# Altium footprint library SYNCBOX_TST.PcbLib: 267 footprints (part 1 of 17)
Each footprint in its own frame and in the unit in brackets; x right, y up, seen from the top. Pads: shape width x height; smd on the part's side, far side on the other; paste and mask are expansions set on the pad; w line width, h text height; cw(c..) or ccw(c..) is an arc to the next point about the centre after c.
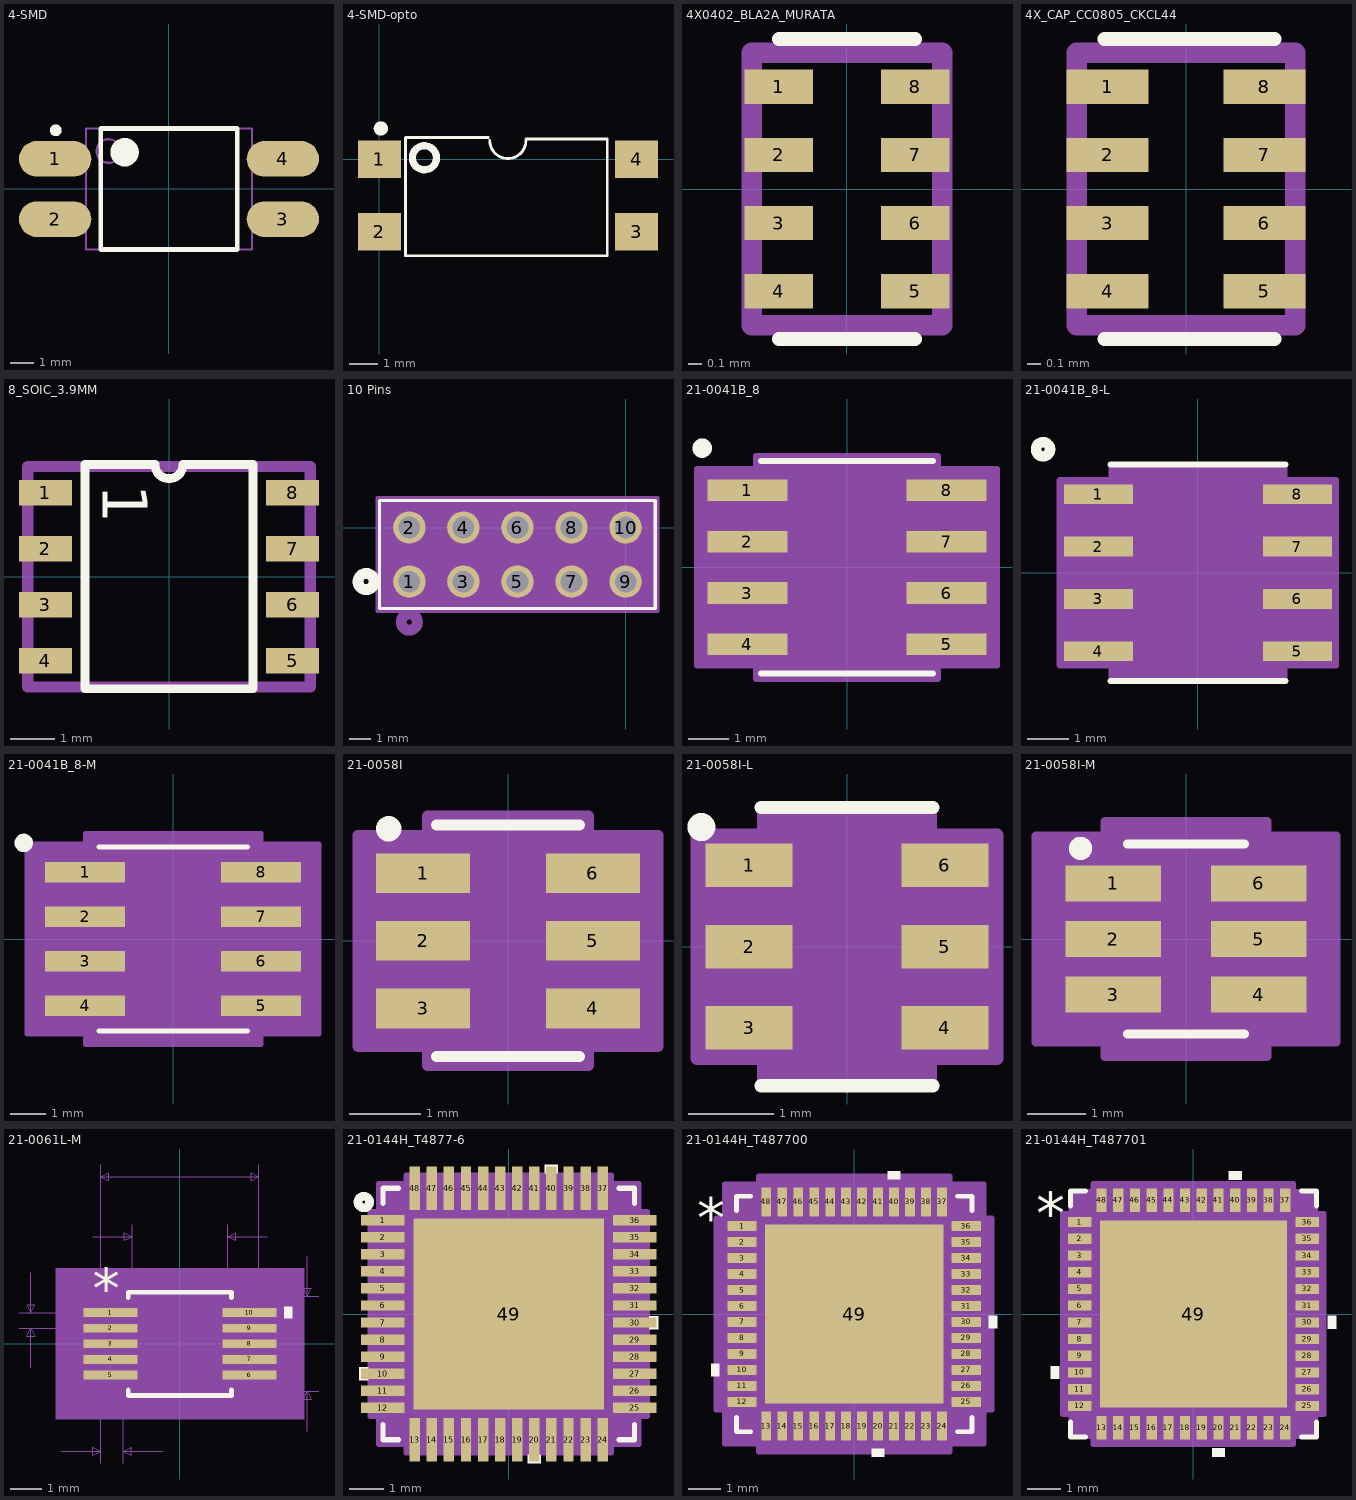
[diagram p0: the footprints below, top view; thin cyan lines are the x and y axes]

## 4-SMD [mm]
height 4.6
pads (4):
  oval 3.05x1.5 smd: 1(-4.8,1.27) 2(-4.8,-1.27) 3(4.8,-1.27) 4(4.8,1.27)
Top Overlay:
  circle w0.6: c-1.875,1.55 r0.3
  lines w0.2: -2.875,-2.55 -2.875,2.55 2.875,2.55 2.875,-2.55 -2.875,-2.55
  lines w0.25: -4.651,2.487 ccw(c-4.775,2.475) -4.65,2.475
Mechanical 13:
  circle w0.1: c-2.55,1.6 r0.5
  lines w0.1: -3.5,-2.55 -3.5,2.55 3.5,2.55 3.5,-2.55 -3.5,-2.55
3D body "LSOP-4.STEP": height 2.07, standoff -0.07, extent -4.947,-1.898 5.253,2.202

## 4-SMD-opto [mm]
pads (4):
  rect 1.5x1.3 smd: 1(0,0) 2(0,-2.54) 3(9,-2.54) 4(9,0)
Top Overlay:
  circle w0.254: c1.575,0.051 r0.423
  lines w0.1: 3.81,0.762 0.914,0.762 0.914,-3.378 7.976,-3.378 7.976,0.711 5.135,0.711 ; 3.861,0.66 ccw(c4.496,0.66) 5.131,0.66
  lines w0.25: 0.175,1.09 ccw(c0.051,1.078) 0.176,1.078
3D body "LSOP-4.STEP": height 2.09, standoff -0.05, extent -0.629,-3.345 9.571,0.755

## 4X0402_BLA2A_MURATA [mm]
pads (8):
  rect 0.5x0.25 smd mask+0.025: 1(-0.5,0.75) 2(-0.5,0.25) 3(-0.5,-0.25) 4(-0.5,-0.75) 5(0.5,-0.75) 6(0.5,-0.25) 7(0.5,0.25) 8(0.5,0.75)
Top Overlay:
  lines w0.1: -0.5,-1.1 0.5,-1.1 ; -0.5,1.1 0.5,1.1
Mechanical 16:
  lines w0.15: -0.7,-1 0.7,-1 0.7,1 -0.7,1 -0.7,-1
Mechanical 29:
  text ".Designator" at 0.2,-0.7 h0.4
3D body: height 0.5, standoff 0, extent -0.5,-1 0.5,1

## 4X_CAP_CC0805_CKCL44 [mm]
pads (8):
  rect 0.6x0.25 smd mask+0.025: 1(-0.575,0.75) 2(-0.575,0.25) 3(-0.575,-0.25) 4(-0.575,-0.75) 5(0.575,-0.75) 6(0.575,-0.25) 7(0.575,0.25) 8(0.575,0.75)
Top Overlay:
  lines w0.1: -0.6,-1.1 0.65,-1.1 ; -0.6,1.1 0.65,1.1
Mechanical 16:
  lines w0.15: -0.8,-1 -0.8,1 0.8,1 0.8,-1 -0.8,-1
Mechanical 29:
  text ".Designator" at -0.2,0.7 h0.4
3D body: height 1, standoff 0, extent -0.7,-1 0.7,1

## 8_SOIC_3.9MM [mm]
pads (8):
  rect 1.2x0.58 smd: 1(-2.8,1.905) 2(-2.8,0.635) 3(-2.8,-0.635) 4(-2.8,-1.905) 5(2.8,-1.905) 6(2.8,-0.635) 7(2.8,0.635) 8(2.8,1.905)
Top Overlay:
  lines w0.2: -1.905,-2.54 1.905,-2.54 1.905,2.54 0.318,2.54 cw(c0,2.54) -0.318,2.54 -1.905,2.54 -1.905,-2.54
  text "1" at -1.5,2.1 h1.02
Mechanical 16:
  circle w0.254: c-2.7,1.9 r0.1
  lines w0.254: -3.2,-2.5 -3.2,2.5 3.2,2.5 3.2,-2.5 -3.2,-2.5
Mechanical 29:
  text ".Designator" at 1.1,0.6 h1.52
3D body "SOIC-8-1.step": height 1.75, standoff 0, extent -3,-2.45 3,2.45

## 10 Pins [mil]
pads (10):
  round 60 hole 40 paste+0 mask+0: 1(-400,-100) 2(-400,0) 3(-300,-100) 4(-300,0) 5(-200,-100) 6(-200,0) 7(-100,-100) 8(-100,0) 9(0,-100) 10(0,0)
Top Overlay:
  circle w20: c-480,-100 r15
  lines w6: -455,-150 55,-150 55,50 -455,50 -455,-150
Bottom Overlay:
  circle w20: c-480,-100 r15
Mechanical 13:
  circle w20: c-400,-175 r15
  lines w1: -450,-145 50,-145 50,45 -450,45 -450,-145
Mechanical 15:
  region: 60,55 -460,55 -460,-155 60,-155
  region: 50,45 -450,45 -450,-145 50,-145
  lines w6: -460,-155 -460,55 60,55 60,-155 -460,-155
3D body "PR20205VBDN.STEP": height 329.79, standoff -100.11, extent -450,-150 50,50
3D body: height 10, standoff 0, extent 0,0 10,10

## 21-0041B_8 [mil]
pads (8):
  rect 78x21 smd paste+0 mask+0: 1(-97,75) 2(-97,25) 3(-97,-25) 4(-97,-75) 5(97,-75) 6(97,-25) 7(97,25) 8(97,75)
Top Overlay:
  circle w10: c-141,116 r4.47
  lines w6: -83.5,-103.5 83.5,-103.5 ; -83.5,103.5 83.5,103.5
Mechanical 13:
  lines w0: -12,98.5 ccw(c0,98.5) 12,98.5
  lines w1: -122,-84.5 -122,-65.5 -78.5,-65.5 -78.5,-84.5 -122,-84.5 ; -122,-34.5 -122,-15.5 -78.5,-15.5 -78.5,-34.5 -122,-34.5 ; -122,15.5 -122,34.5 -78.5,34.5 -78.5,15.5 -122,15.5 ; -122,65.5 -122,84.5 -78.5,84.5 -78.5,65.5 -122,65.5 ; -78.5,-98.5 78.5,-98.5 78.5,98.5 -78.5,98.5 -78.5,-98.5 ; 78.5,-84.5 78.5,-65.5 122,-65.5 122,-84.5 78.5,-84.5 ; 78.5,-34.5 78.5,-15.5 122,-15.5 122,-34.5 78.5,-34.5 ; 78.5,15.5 78.5,34.5 122,34.5 122,15.5 78.5,15.5 ; 78.5,65.5 78.5,84.5 122,84.5 122,65.5 78.5,65.5
  text "*" at -76,45.5 h50
Mechanical 15:
  region: -88.5,-95.5 -146,-95.5 -146,95.5 -88.5,95.5 -88.5,108.5 88.5,108.5 88.5,95.5 146,95.5 146,-95.5 88.5,-95.5 88.5,-108.5 -88.5,-108.5
  lines w6: -146,-95.5 -146,95.5 -88.5,95.5 -88.5,108.5 88.5,108.5 88.5,95.5 146,95.5 146,-95.5 88.5,-95.5 88.5,-108.5 -88.5,-108.5 -88.5,-95.5 -146,-95.5
3D body "21-0041B_8.stp": height 69.09, standoff 0, extent -122.01,-98.5 122.01,98.5
3D body: height 10, standoff 0, extent 0,0 10,10

## 21-0041B_8-L [mil]
pads (8):
  rect 66x19 smd paste+0 mask+0: 1(-95,75) 2(-95,25) 3(-95,-25) 4(-95,-75) 5(95,-75) 6(95,-25) 7(95,25) 8(95,75)
Top Overlay:
  circle w10: c-148,118 r6.71
  lines w6: -83.5,-103.5 83.5,-103.5 ; -83.5,103.5 83.5,103.5
Mechanical 13:
  lines w0: -12,98.5 ccw(c0,98.5) 12,98.5
  lines w1: -122,-84.5 -122,-65.5 -78.5,-65.5 -78.5,-84.5 -122,-84.5 ; -122,-34.5 -122,-15.5 -78.5,-15.5 -78.5,-34.5 -122,-34.5 ; -122,15.5 -122,34.5 -78.5,34.5 -78.5,15.5 -122,15.5 ; -122,65.5 -122,84.5 -78.5,84.5 -78.5,65.5 -122,65.5 ; -78.5,-98.5 78.5,-98.5 78.5,98.5 -78.5,98.5 -78.5,-98.5 ; 78.5,-84.5 78.5,-65.5 122,-65.5 122,-84.5 78.5,-84.5 ; 78.5,-34.5 78.5,-15.5 122,-15.5 122,-34.5 78.5,-34.5 ; 78.5,15.5 78.5,34.5 122,34.5 122,15.5 78.5,15.5 ; 78.5,65.5 78.5,84.5 122,84.5 122,65.5 78.5,65.5
  text "*" at -76,45.5 h50
Mechanical 15:
  region: -82.5,-88.5 -132,-88.5 -132,88.5 -82.5,88.5 -82.5,102.5 82.5,102.5 82.5,88.5 132,88.5 132,-88.5 82.5,-88.5 82.5,-102.5 -82.5,-102.5
  lines w6: -132,-88.5 -132,88.5 -82.5,88.5 -82.5,102.5 82.5,102.5 82.5,88.5 132,88.5 132,-88.5 82.5,-88.5 82.5,-102.5 -82.5,-102.5 -82.5,-88.5 -132,-88.5
3D body: height 10, standoff 0, extent 0,0 10,10
3D body "21-0041B_8-L.stp": height 69.09, standoff 0, extent -122,-98.5 122.01,98.51

## 21-0041B_8-M [mil]
pads (8):
  rect 90x23 smd paste+0 mask+0: 1(-99,75) 2(-99,25) 3(-99,-25) 4(-99,-75) 5(99,-75) 6(99,-25) 7(99,25) 8(99,75)
Top Overlay:
  circle w10: c-168,108 r5.39
  lines w6: -83.5,-103.5 83.5,-103.5 ; -83.5,103.5 83.5,103.5
Mechanical 13:
  lines w0: -12,98.5 ccw(c0,98.5) 12,98.5
  lines w1: -122,-84.5 -122,-65.5 -78.5,-65.5 -78.5,-84.5 -122,-84.5 ; -122,-34.5 -122,-15.5 -78.5,-15.5 -78.5,-34.5 -122,-34.5 ; -122,15.5 -122,34.5 -78.5,34.5 -78.5,15.5 -122,15.5 ; -122,65.5 -122,84.5 -78.5,84.5 -78.5,65.5 -122,65.5 ; -78.5,-98.5 78.5,-98.5 78.5,98.5 -78.5,98.5 -78.5,-98.5 ; 78.5,-84.5 78.5,-65.5 122,-65.5 122,-84.5 78.5,-84.5 ; 78.5,-34.5 78.5,-15.5 122,-15.5 122,-34.5 78.5,-34.5 ; 78.5,15.5 78.5,34.5 122,34.5 122,15.5 78.5,15.5 ; 78.5,65.5 78.5,84.5 122,84.5 122,65.5 78.5,65.5
  text "*" at -76,45.5 h50
Mechanical 15:
  region: -98.5,-106.5 -164,-106.5 -164,106.5 -98.5,106.5 -98.5,118.5 98.5,118.5 98.5,106.5 164,106.5 164,-106.5 98.5,-106.5 98.5,-118.5 -98.5,-118.5
  lines w6: -164,-106.5 -164,106.5 -98.5,106.5 -98.5,118.5 98.5,118.5 98.5,106.5 164,106.5 164,-106.5 98.5,-106.5 98.5,-118.5 -98.5,-118.5 -98.5,-106.5 -164,-106.5
3D body "21-0041B_8-M.stp": height 69.09, standoff 0, extent -122,-98.5 122.01,98.51
3D body: height 10, standoff 0, extent 0,0 10,10

## 21-0058I [mil]
pads (6):
  rect 52x22 smd paste+0 mask+0: 1(-47,37.4) 2(-47,0) 3(-47,-37.4) 4(47,-37.4) 5(47,0) 6(47,37.4)
Top Overlay:
  circle w10: c-66,62 r2
  lines w6: -39.5,-64 39.5,-64 ; -39.5,64 39.5,64
Mechanical 13:
  lines w0: -12,59 ccw(c0,59) 12,59
  lines w1: -59,-47.4 -59,-27.4 -34.5,-27.4 -34.5,-47.4 -59,-47.4 ; -59,-10 -59,10 -34.5,10 -34.5,-10 -59,-10 ; -59,27.4 -59,47.4 -34.5,47.4 -34.5,27.4 -59,27.4 ; -34.5,-59 34.5,-59 34.5,59 -34.5,59 -34.5,-59 ; 34.5,-47.4 34.5,-27.4 59,-27.4 59,-47.4 34.5,-47.4 ; 34.5,-10 34.5,10 59,10 59,-10 34.5,-10 ; 34.5,27.4 34.5,47.4 59,47.4 59,27.4 34.5,27.4
  text "*" at -32,6 h50
Mechanical 15:
  region: -44.5,-58.4 -83,-58.4 -83,58.4 -44.5,58.4 -44.5,69 44.5,69 44.5,58.4 83,58.4 83,-58.4 44.5,-58.4 44.5,-69 -44.5,-69
  lines w6: -83,-58.4 -83,58.4 -44.5,58.4 -44.5,69 44.5,69 44.5,58.4 83,58.4 83,-58.4 44.5,-58.4 44.5,-69 -44.5,-69 -44.5,-58.4 -83,-58.4
3D body: height 10, standoff 0, extent 0,0 10,10
3D body "21-0058I.stp": height 57.09, standoff 0, extent -59.02,-59.02 59.02,59.02

## 21-0058I-L [mil]
pads (6):
  rect 40x20 smd paste+0 mask+0: 1(-45,37.4) 2(-45,0) 3(-45,-37.4) 4(45,-37.4) 5(45,0) 6(45,37.4)
Top Overlay:
  circle w10: c-67,55 r1.41
  lines w6: -39.5,-64 39.5,-64 ; -39.5,64 39.5,64
Mechanical 13:
  lines w0: -12,59 ccw(c0,59) 12,59
  lines w1: -59,-47.4 -59,-27.4 -34.5,-27.4 -34.5,-47.4 -59,-47.4 ; -59,-10 -59,10 -34.5,10 -34.5,-10 -59,-10 ; -59,27.4 -59,47.4 -34.5,47.4 -34.5,27.4 -59,27.4 ; -34.5,-59 34.5,-59 34.5,59 -34.5,59 -34.5,-59 ; 34.5,-47.4 34.5,-27.4 59,-27.4 59,-47.4 34.5,-47.4 ; 34.5,-10 34.5,10 59,10 59,-10 34.5,-10 ; 34.5,27.4 34.5,47.4 59,47.4 59,27.4 34.5,27.4
  text "*" at -32,6 h50
Mechanical 15:
  region: -38.5,-51.4 -69,-51.4 -69,51.4 -38.5,51.4 -38.5,63 38.5,63 38.5,51.4 69,51.4 69,-51.4 38.5,-51.4 38.5,-63 -38.5,-63
  lines w6: -69,-51.4 -69,51.4 -38.5,51.4 -38.5,63 38.5,63 38.5,51.4 69,51.4 69,-51.4 38.5,-51.4 38.5,-63 -38.5,-63 -38.5,-51.4 -69,-51.4
3D body: height 10, standoff 0, extent 0,0 10,10
3D body "21-0058I-L.stp": height 57.09, standoff 0, extent -59.01,-59.01 59.02,59.02

## 21-0058I-M [mil]
pads (6):
  rect 64x24 smd paste+0 mask+0: 1(-49,37.4) 2(-49,0) 3(-49,-37.4) 4(49,-37.4) 5(49,0) 6(49,37.4)
Top Overlay:
  circle w10: c-71,61 r2.83
  lines w6: -39.5,-64 39.5,-64 ; -39.5,64 39.5,64
Mechanical 13:
  lines w0: -12,59 ccw(c0,59) 12,59
  lines w1: -59,-47.4 -34.5,-47.4 -34.5,-27.4 -59,-27.4 -59,-47.4 ; -59,-10 -34.5,-10 -34.5,10 -59,10 -59,-10 ; -59,27.4 -34.5,27.4 -34.5,47.4 -59,47.4 -59,27.4 ; -34.5,-59 -34.5,59 34.5,59 34.5,-59 -34.5,-59 ; 34.5,-47.4 59,-47.4 59,-27.4 34.5,-27.4 34.5,-47.4 ; 34.5,-10 59,-10 59,10 34.5,10 34.5,-10 ; 34.5,27.4 59,27.4 59,47.4 34.5,47.4 34.5,27.4
  text "*" at -32,6 h50
Mechanical 15:
  region: -54.5,-69.4 -101,-69.4 -101,69.4 -54.5,69.4 -54.5,79 54.5,79 54.5,69.4 101,69.4 101,-69.4 54.5,-69.4 54.5,-79 -54.5,-79
  lines w6: -101,-69.4 -54.5,-69.4 -54.5,-79 54.5,-79 54.5,-69.4 101,-69.4 101,69.4 54.5,69.4 54.5,79 -54.5,79 -54.5,69.4 -101,69.4 -101,-69.4
3D body "21-0058I-M.stp": height 57.09, standoff 0, extent -59.01,-59.01 59.02,59.02
3D body: height 10, standoff 0, extent 0,0 10,10

## 21-0061L-M [mil]
pads (10):
  rect 68x11 smd paste+0 mask+0: 1(-87.5,39.37) 2(-87.5,19.68) 3(-87.5,0) 4(-87.5,-19.68) 5(-87.5,-39.37) 6(87.5,-39.37) 7(87.5,-19.68) 8(87.5,0) 9(87.5,19.68) 10(87.5,39.37)
Top Overlay:
  region: 131.5,46.87 141.5,46.87 141.5,31.87 131.5,31.87
  lines w6: -65,-57.97 -65,-65 65,-65 65,-57.97 ; -65,57.97 -65,65 65,65 65,57.97
  text "*" at -110,45.37 h50
Mechanical 5:
  region: 156.5,-95 -156.5,-95 -156.5,95 156.5,95
Mechanical 7:
  lines w1: -202.5,19.68 -87.5,19.68 ; -202.5,39.37 -87.5,39.37 ; -187.5,-30.32 -187.5,19.68 ; -187.5,89.37 -187.5,39.37 ; -149.5,-135 -99.5,-135 ; -110,135 -60,135 ; -99.5,-150 -99.5,0 -99.5,225 ; -71.5,-150 -71.5,0 ; -60,0 -60,150 ; -21.5,-135 -71.5,-135 ; 0,-60 175,-60 ; 0,60 175,60 ; 60,0 60,150 ; 99.5,0 99.5,225 ; 110,135 60,135 ; 160,-110 160,-60 ; 160,110 160,60 ; -187.5,19.68 -182.5,9.69 -192.5,9.69 -187.5,19.68 ; -187.5,39.37 -182.5,49.37 -192.5,49.37 -187.5,39.37 ; -99.5,-135 -109.5,-140 -109.5,-130 -99.5,-135 ; -99.5,210 -89.5,205 -89.5,215 -99.5,210 ; -99.5,210 99.5,210 ; -71.5,-135 -61.5,-140 -61.5,-130 -71.5,-135 ; -60,135 -70,130 -70,140 -60,135 ; 60,135 70,130 70,140 60,135 ; 99.5,210 89.5,205 89.5,215 99.5,210 ; 160,-60 165,-70 155,-70 160,-60 ; 160,60 165,70 155,70 160,60
  text "0.028in/0.711mm" at -179.25,-180 h25
  text "0.02in/0.5mm" at -357.5,17.03 h25
  text "0.12in/3.048mm" at 180,-12.5 h25
  text "0.199in/5.055mm" at -93.75,230 h25
  text "0.12in/3.048mm" at -87.5,155 h25
  text "Alt 2 Padstyle: OX90Y60D30P" at -337.5,-560 h50
  text "Alt 1 Padstyle: OX60Y90D30P" at -337.5,-500 h50
  text "Pin One Padstyle: RX68Y11D0T" at -350,-320 h50
  text "Default Padstyle: RX68Y11D0T" at -350,-260 h50
Mechanical 13:
  lines w0: -12,60 ccw(c0,60) 12,60
  lines w1: -99.5,-44.87 -60,-44.87 -60,-33.87 -99.5,-33.87 -99.5,-44.87 ; -99.5,-25.18 -60,-25.18 -60,-14.19 -99.5,-14.19 -99.5,-25.18 ; -99.5,-5.5 -60,-5.5 -60,5.5 -99.5,5.5 -99.5,-5.5 ; -99.5,14.19 -60,14.19 -60,25.18 -99.5,25.18 -99.5,14.19 ; -99.5,33.87 -60,33.87 -60,44.87 -99.5,44.87 -99.5,33.87 ; -60,-60 -60,60 60,60 60,-60 -60,-60 ; 60,-44.87 99.5,-44.87 99.5,-33.87 60,-33.87 60,-44.87 ; 60,-25.18 99.5,-25.18 99.5,-14.19 60,-14.19 60,-25.18 ; 60,-5.5 99.5,-5.5 99.5,5.5 60,5.5 60,-5.5 ; 60,14.19 99.5,14.19 99.5,25.18 60,25.18 60,14.19 ; 60,33.87 99.5,33.87 99.5,44.87 60,44.87 60,33.87
  text "*" at -57.5,7 h50
Mechanical 15:
  region: -80,-64.87 -141.5,-64.87 -141.5,64.87 -80,64.87 -80,80 80,80 80,64.87 141.5,64.87 141.5,-64.87 80,-64.87 80,-80 -80,-80
  lines w6: -141.5,-64.87 -80,-64.87 -80,-80 80,-80 80,-64.87 141.5,-64.87 141.5,64.87 80,64.87 80,80 -80,80 -80,64.87 -141.5,64.87 -141.5,-64.87
3D body: height 10, standoff 0, extent 0,0 10,10
3D body "21-0061L-M.step": height 43.11, standoff 0, extent -99.48,-60 99.49,60

## 21-0144H_T4877-6 [mil]
pads (49):
  rect 50x12 smd paste+0 mask+0: 1(-145,108.27) 2(-145,88.58) 3(-145,68.9) 4(-145,49.21) 5(-145,29.53) 6(-145,9.84) 7(-145,-9.84) 8(-145,-29.53) 9(-145,-49.21) 10(-145,-68.9) 11(-145,-88.58) 12(-145,-108.27) 25(145,-108.27) 26(145,-88.58) 27(145,-68.9) 28(145,-49.21) 29(145,-29.53) 30(145,-9.84) 31(145,9.84) 32(145,29.53) 33(145,49.21) 34(145,68.9) 35(145,88.58) 36(145,108.27)
  rect 12x50 smd paste+0 mask+0: 13(-108.27,-145) 14(-88.58,-145) 15(-68.9,-145) 16(-49.21,-145) 17(-29.53,-145) 18(-9.84,-145) 19(9.84,-145) 20(29.53,-145) 21(49.21,-145) 22(68.9,-145) 23(88.58,-145) 24(108.27,-145) 37(108.27,145) 38(88.58,145) 39(68.9,145) 40(49.21,145) 41(29.53,145) 42(9.84,145) 43(-9.84,145) 44(-29.53,145) 45(-49.21,145) 46(-68.9,145) 47(-88.58,145) 48(-108.27,145)
  rect 220x220 smd paste-109.5 mask+0: 49(0,0)
Top Overlay:
  circle w10: c-167,129 r6.71
  region: 56.71,162 41.71,162 41.71,172 56.71,172
  region: 162,-2.34 172,-2.34 172,-17.34 162,-17.34
  region: 37.03,-162 22.03,-162 22.03,-172 37.03,-172
  region: -162,-61.4 -172,-61.4 -172,-76.4 -162,-76.4
  lines w6: -145,-127.37 -145,-145 -127.37,-145 ; -145,127.37 -145,145 -127.37,145 ; 127.37,-145 145,-145 145,-127.37 ; 127.37,145 145,145 145,127.37
Top Paste:
  region: 106.06,-58.94 58.94,-58.94 58.94,-106.06 106.06,-106.06
  region: 106.06,-3.94 58.94,-3.94 58.94,-51.06 106.06,-51.06
  region: 106.06,51.06 58.94,51.06 58.94,3.94 106.06,3.94
  region: 106.06,106.06 58.94,106.06 58.94,58.94 106.06,58.94
  region: 51.06,-58.94 3.94,-58.94 3.94,-106.06 51.06,-106.06
  region: 51.06,-3.94 3.94,-3.94 3.94,-51.06 51.06,-51.06
  region: 51.06,51.06 3.94,51.06 3.94,3.94 51.06,3.94
  region: 51.06,106.06 3.94,106.06 3.94,58.94 51.06,58.94
  region: -3.94,-58.94 -51.06,-58.94 -51.06,-106.06 -3.94,-106.06
  region: -3.94,-3.94 -51.06,-3.94 -51.06,-51.06 -3.94,-51.06
  region: -3.94,51.06 -51.06,51.06 -51.06,3.94 -3.94,3.94
  region: -3.94,106.06 -51.06,106.06 -51.06,58.94 -3.94,58.94
  region: -58.94,-58.94 -106.06,-58.94 -106.06,-106.06 -58.94,-106.06
  region: -58.94,-3.94 -106.06,-3.94 -106.06,-51.06 -58.94,-51.06
  region: -58.94,51.06 -106.06,51.06 -106.06,3.94 -58.94,3.94
  region: -58.94,106.06 -106.06,106.06 -106.06,58.94 -58.94,58.94
Mechanical 13:
  lines w1: -140,90 -90,140 ; -140,-140 -140,140 140,140 140,-140 -140,-140 ; -140,-114.27 -140,-102.27 -140,-114.27 ; -140,-94.58 -140,-82.58 -140,-94.58 ; -140,-74.9 -140,-62.9 -140,-74.9 ; -140,-55.21 -140,-43.21 -140,-55.21 ; -140,-35.53 -140,-23.53 -140,-35.53 ; -140,-15.84 -140,-3.84 -140,-15.84 ; -140,3.84 -140,15.84 -140,3.84 ; -140,23.53 -140,35.53 -140,23.53 ; -140,43.21 -140,55.21 -140,43.21 ; -140,62.9 -140,74.9 -140,62.9 ; -140,82.58 -140,94.58 -140,82.58 ; -140,102.27 -140,114.27 -140,102.27 ; -114.27,-140 -102.27,-140 -114.27,-140 ; -114.27,140 -102.27,140 -114.27,140 ; -94.58,-140 -82.58,-140 -94.58,-140 ; -94.58,140 -82.58,140 -94.58,140 ; -74.9,-140 -62.9,-140 -74.9,-140 ; -74.9,140 -62.9,140 -74.9,140 ; -55.21,-140 -43.21,-140 -55.21,-140 ; -55.21,140 -43.21,140 -55.21,140 ; -35.53,-140 -23.53,-140 -35.53,-140 ; -35.53,140 -23.53,140 -35.53,140 ; -15.84,-140 -3.84,-140 -15.84,-140 ; -15.84,140 -3.84,140 -15.84,140 ; 3.84,-140 15.84,-140 3.84,-140 ; 3.84,140 15.84,140 3.84,140 ; 23.53,-140 35.53,-140 23.53,-140 ; 23.53,140 35.53,140 23.53,140 ; 43.21,-140 55.21,-140 43.21,-140 ; 43.21,140 55.21,140 43.21,140 ; 62.9,-140 74.9,-140 62.9,-140 ; 62.9,140 74.9,140 62.9,140 ; 82.58,-140 94.58,-140 82.58,-140 ; 82.58,140 94.58,140 82.58,140 ; 102.27,-140 114.27,-140 102.27,-140 ; 102.27,140 114.27,140 102.27,140 ; 140,-114.27 140,-102.27 140,-114.27 ; 140,-94.58 140,-82.58 140,-94.58 ; 140,-74.9 140,-62.9 140,-74.9 ; 140,-55.21 140,-43.21 140,-55.21 ; 140,-35.53 140,-23.53 140,-35.53 ; 140,-15.84 140,-3.84 140,-15.84 ; 140,3.84 140,15.84 140,3.84 ; 140,23.53 140,35.53 140,23.53 ; 140,43.21 140,55.21 140,43.21 ; 140,62.9 140,74.9 140,62.9 ; 140,82.58 140,94.58 140,82.58 ; 140,102.27 140,114.27 140,102.27
  text "*" at -132.5,93.11 h50
Mechanical 15:
  region: -118.11,-150 -150,-150 -150,-118.11 -160,-118.11 -160,118.11 -150,118.11 -150,150 -118.11,150 -118.11,160 118.11,160 118.11,150 150,150 150,118.11 160,118.11 160,-118.11 150,-118.11 150,-150 118.11,-150 118.11,-160 -118.11,-160
  lines w6: -160,-118.11 -160,118.11 -150,118.11 -150,150 -118.11,150 -118.11,160 118.11,160 118.11,150 150,150 150,118.11 160,118.11 160,-118.11 150,-118.11 150,-150 118.11,-150 118.11,-160 -118.11,-160 -118.11,-150 -150,-150 -150,-118.11 -160,-118.11
3D body: height 10, standoff 0, extent 0,0 10,10
3D body "21-0144H_T4877-6.stp": height 32.09, standoff 0, extent -140,-140 140,140

## 21-0144H_T487700 [mil]
pads (49):
  rect 36x12 smd paste+0 mask+0: 1(-138,108.27) 2(-138,88.58) 3(-138,68.9) 4(-138,49.21) 5(-138,29.53) 6(-138,9.84) 7(-138,-9.84) 8(-138,-29.53) 9(-138,-49.21) 10(-138,-68.9) 11(-138,-88.58) 12(-138,-108.27) 25(138,-108.27) 26(138,-88.58) 27(138,-68.9) 28(138,-49.21) 29(138,-29.53) 30(138,-9.84) 31(138,9.84) 32(138,29.53) 33(138,49.21) 34(138,68.9) 35(138,88.58) 36(138,108.27)
  rect 12x36 smd paste+0 mask+0: 13(-108.27,-138) 14(-88.58,-138) 15(-68.9,-138) 16(-49.21,-138) 17(-29.53,-138) 18(-9.84,-138) 19(9.84,-138) 20(29.53,-138) 21(49.21,-138) 22(68.9,-138) 23(88.58,-138) 24(108.27,-138) 37(108.27,138) 38(88.58,138) 39(68.9,138) 40(49.21,138) 41(29.53,138) 42(9.84,138) 43(-9.84,138) 44(-29.53,138) 45(-49.21,138) 46(-68.9,138) 47(-88.58,138) 48(-108.27,138)
  rect 220x220 smd paste-109.5 mask+0: 49(0,0)
Top Overlay:
  region: -166,-61.4 -176,-61.4 -176,-76.4 -166,-76.4
  region: 37.03,-166 22.03,-166 22.03,-176 37.03,-176
  region: 166,-2.34 176,-2.34 176,-17.34 166,-17.34
  region: 56.71,166 41.71,166 41.71,176 56.71,176
  lines w6: -145,-127.37 -145,-145 -127.37,-145 ; -145,127.37 -145,145 -127.37,145 ; 127.37,-145 145,-145 145,-127.37 ; 127.37,145 145,145 145,127.37
  text "*" at -193.5,93.11 h50
Top Paste:
  region: -58.94,106.06 -106.06,106.06 -106.06,58.94 -58.94,58.94
  region: -58.94,51.06 -106.06,51.06 -106.06,3.94 -58.94,3.94
  region: -58.94,-3.94 -106.06,-3.94 -106.06,-51.06 -58.94,-51.06
  region: -58.94,-58.94 -106.06,-58.94 -106.06,-106.06 -58.94,-106.06
  region: -3.94,106.06 -51.06,106.06 -51.06,58.94 -3.94,58.94
  region: -3.94,51.06 -51.06,51.06 -51.06,3.94 -3.94,3.94
  region: -3.94,-3.94 -51.06,-3.94 -51.06,-51.06 -3.94,-51.06
  region: -3.94,-58.94 -51.06,-58.94 -51.06,-106.06 -3.94,-106.06
  region: 51.06,106.06 3.94,106.06 3.94,58.94 51.06,58.94
  region: 51.06,51.06 3.94,51.06 3.94,3.94 51.06,3.94
  region: 51.06,-3.94 3.94,-3.94 3.94,-51.06 51.06,-51.06
  region: 51.06,-58.94 3.94,-58.94 3.94,-106.06 51.06,-106.06
  region: 106.06,106.06 58.94,106.06 58.94,58.94 106.06,58.94
  region: 106.06,51.06 58.94,51.06 58.94,3.94 106.06,3.94
  region: 106.06,-3.94 58.94,-3.94 58.94,-51.06 106.06,-51.06
  region: 106.06,-58.94 58.94,-58.94 58.94,-106.06 106.06,-106.06
Mechanical 13:
  lines w1: -140,90 -90,140 ; -140,-140 140,-140 140,140 -140,140 -140,-140 ; -140,-114.27 -140,-102.27 -140,-114.27 ; -140,-94.58 -140,-82.58 -140,-94.58 ; -140,-74.9 -140,-62.9 -140,-74.9 ; -140,-55.21 -140,-43.21 -140,-55.21 ; -140,-35.53 -140,-23.53 -140,-35.53 ; -140,-15.84 -140,-3.84 -140,-15.84 ; -140,3.84 -140,15.84 -140,3.84 ; -140,23.53 -140,35.53 -140,23.53 ; -140,43.21 -140,55.21 -140,43.21 ; -140,62.9 -140,74.9 -140,62.9 ; -140,82.58 -140,94.58 -140,82.58 ; -140,102.27 -140,114.27 -140,102.27 ; -114.27,-140 -102.27,-140 -114.27,-140 ; -114.27,140 -102.27,140 -114.27,140 ; -94.58,-140 -82.58,-140 -94.58,-140 ; -94.58,140 -82.58,140 -94.58,140 ; -74.9,-140 -62.9,-140 -74.9,-140 ; -74.9,140 -62.9,140 -74.9,140 ; -55.21,-140 -43.21,-140 -55.21,-140 ; -55.21,140 -43.21,140 -55.21,140 ; -35.53,-140 -23.53,-140 -35.53,-140 ; -35.53,140 -23.53,140 -35.53,140 ; -15.84,-140 -3.84,-140 -15.84,-140 ; -15.84,140 -3.84,140 -15.84,140 ; 3.84,-140 15.84,-140 3.84,-140 ; 3.84,140 15.84,140 3.84,140 ; 23.53,-140 35.53,-140 23.53,-140 ; 23.53,140 35.53,140 23.53,140 ; 43.21,-140 55.21,-140 43.21,-140 ; 43.21,140 55.21,140 43.21,140 ; 62.9,-140 74.9,-140 62.9,-140 ; 62.9,140 74.9,140 62.9,140 ; 82.58,-140 94.58,-140 82.58,-140 ; 82.58,140 94.58,140 82.58,140 ; 102.27,-140 114.27,-140 102.27,-140 ; 102.27,140 114.27,140 102.27,140 ; 140,-114.27 140,-102.27 140,-114.27 ; 140,-94.58 140,-82.58 140,-94.58 ; 140,-74.9 140,-62.9 140,-74.9 ; 140,-55.21 140,-43.21 140,-55.21 ; 140,-35.53 140,-23.53 140,-35.53 ; 140,-15.84 140,-3.84 140,-15.84 ; 140,3.84 140,15.84 140,3.84 ; 140,23.53 140,35.53 140,23.53 ; 140,43.21 140,55.21 140,43.21 ; 140,62.9 140,74.9 140,62.9 ; 140,82.58 140,94.58 140,82.58 ; 140,102.27 140,114.27 140,102.27
  text "*" at -132.5,93.11 h50
Mechanical 15:
  region: -118.11,-160 -160,-160 -160,-118.11 -170,-118.11 -170,118.11 -160,118.11 -160,160 -118.11,160 -118.11,170 118.11,170 118.11,160 160,160 160,118.11 170,118.11 170,-118.11 160,-118.11 160,-160 118.11,-160 118.11,-170 -118.11,-170
  lines w6: -170,-118.11 -160,-118.11 -160,-160 -118.11,-160 -118.11,-170 118.11,-170 118.11,-160 160,-160 160,-118.11 170,-118.11 170,118.11 160,118.11 160,160 118.11,160 118.11,170 -118.11,170 -118.11,160 -160,160 -160,118.11 -170,118.11 -170,-118.11
3D body: height 10, standoff 0, extent 0,0 10,10
3D body "21-0144H_T4877-6-M.stp": height 32.09, standoff 0, extent -140,-140 140,140

## 21-0144H_T487701 [mil]
pads (49):
  rect 28x12 smd paste+0 mask+0: 1(-134,108.27) 2(-134,88.58) 3(-134,68.9) 4(-134,49.21) 5(-134,29.53) 6(-134,9.84) 7(-134,-9.84) 8(-134,-29.53) 9(-134,-49.21) 10(-134,-68.9) 11(-134,-88.58) 12(-134,-108.27) 25(134,-108.27) 26(134,-88.58) 27(134,-68.9) 28(134,-49.21) 29(134,-29.53) 30(134,-9.84) 31(134,9.84) 32(134,29.53) 33(134,49.21) 34(134,68.9) 35(134,88.58) 36(134,108.27)
  rect 12x28 smd paste+0 mask+0: 13(-108.27,-134) 14(-88.58,-134) 15(-68.9,-134) 16(-49.21,-134) 17(-29.53,-134) 18(-9.84,-134) 19(9.84,-134) 20(29.53,-134) 21(49.21,-134) 22(68.9,-134) 23(88.58,-134) 24(108.27,-134) 37(108.27,134) 38(88.58,134) 39(68.9,134) 40(49.21,134) 41(29.53,134) 42(9.84,134) 43(-9.84,134) 44(-29.53,134) 45(-49.21,134) 46(-68.9,134) 47(-88.58,134) 48(-108.27,134)
  rect 220x220 smd paste-109.5 mask+0: 49(0,0)
Top Overlay:
  region: -158,-61.4 -168,-61.4 -168,-76.4 -158,-76.4
  region: 37.03,-158 22.03,-158 22.03,-168 37.03,-168
  region: 158,-2.34 168,-2.34 168,-17.34 158,-17.34
  region: 56.71,158 41.71,158 41.71,168 56.71,168
  lines w6: -145,-127.37 -145,-145 -127.37,-145 ; -145,127.37 -145,145 -127.37,145 ; 127.37,-145 145,-145 145,-127.37 ; 127.37,145 145,145 145,127.37
  text "*" at -185.5,93.11 h50
Top Paste:
  region: -58.94,106.06 -106.06,106.06 -106.06,58.94 -58.94,58.94
  region: -58.94,51.06 -106.06,51.06 -106.06,3.94 -58.94,3.94
  region: -58.94,-3.94 -106.06,-3.94 -106.06,-51.06 -58.94,-51.06
  region: -58.94,-58.94 -106.06,-58.94 -106.06,-106.06 -58.94,-106.06
  region: -3.94,106.06 -51.06,106.06 -51.06,58.94 -3.94,58.94
  region: -3.94,51.06 -51.06,51.06 -51.06,3.94 -3.94,3.94
  region: -3.94,-3.94 -51.06,-3.94 -51.06,-51.06 -3.94,-51.06
  region: -3.94,-58.94 -51.06,-58.94 -51.06,-106.06 -3.94,-106.06
  region: 51.06,106.06 3.94,106.06 3.94,58.94 51.06,58.94
  region: 51.06,51.06 3.94,51.06 3.94,3.94 51.06,3.94
  region: 51.06,-3.94 3.94,-3.94 3.94,-51.06 51.06,-51.06
  region: 51.06,-58.94 3.94,-58.94 3.94,-106.06 51.06,-106.06
  region: 106.06,106.06 58.94,106.06 58.94,58.94 106.06,58.94
  region: 106.06,51.06 58.94,51.06 58.94,3.94 106.06,3.94
  region: 106.06,-3.94 58.94,-3.94 58.94,-51.06 106.06,-51.06
  region: 106.06,-58.94 58.94,-58.94 58.94,-106.06 106.06,-106.06
Mechanical 13:
  lines w1: -140,90 -90,140 ; -140,-140 140,-140 140,140 -140,140 -140,-140 ; -140,-114.27 -140,-102.27 -140,-114.27 ; -140,-94.58 -140,-82.58 -140,-94.58 ; -140,-74.9 -140,-62.9 -140,-74.9 ; -140,-55.21 -140,-43.21 -140,-55.21 ; -140,-35.53 -140,-23.53 -140,-35.53 ; -140,-15.84 -140,-3.84 -140,-15.84 ; -140,3.84 -140,15.84 -140,3.84 ; -140,23.53 -140,35.53 -140,23.53 ; -140,43.21 -140,55.21 -140,43.21 ; -140,62.9 -140,74.9 -140,62.9 ; -140,82.58 -140,94.58 -140,82.58 ; -140,102.27 -140,114.27 -140,102.27 ; -114.27,-140 -102.27,-140 -114.27,-140 ; -114.27,140 -102.27,140 -114.27,140 ; -94.58,-140 -82.58,-140 -94.58,-140 ; -94.58,140 -82.58,140 -94.58,140 ; -74.9,-140 -62.9,-140 -74.9,-140 ; -74.9,140 -62.9,140 -74.9,140 ; -55.21,-140 -43.21,-140 -55.21,-140 ; -55.21,140 -43.21,140 -55.21,140 ; -35.53,-140 -23.53,-140 -35.53,-140 ; -35.53,140 -23.53,140 -35.53,140 ; -15.84,-140 -3.84,-140 -15.84,-140 ; -15.84,140 -3.84,140 -15.84,140 ; 3.84,-140 15.84,-140 3.84,-140 ; 3.84,140 15.84,140 3.84,140 ; 23.53,-140 35.53,-140 23.53,-140 ; 23.53,140 35.53,140 23.53,140 ; 43.21,-140 55.21,-140 43.21,-140 ; 43.21,140 55.21,140 43.21,140 ; 62.9,-140 74.9,-140 62.9,-140 ; 62.9,140 74.9,140 62.9,140 ; 82.58,-140 94.58,-140 82.58,-140 ; 82.58,140 94.58,140 82.58,140 ; 102.27,-140 114.27,-140 102.27,-140 ; 102.27,140 114.27,140 102.27,140 ; 140,-114.27 140,-102.27 140,-114.27 ; 140,-94.58 140,-82.58 140,-94.58 ; 140,-74.9 140,-62.9 140,-74.9 ; 140,-55.21 140,-43.21 140,-55.21 ; 140,-35.53 140,-23.53 140,-35.53 ; 140,-15.84 140,-3.84 140,-15.84 ; 140,3.84 140,15.84 140,3.84 ; 140,23.53 140,35.53 140,23.53 ; 140,43.21 140,55.21 140,43.21 ; 140,62.9 140,74.9 140,62.9 ; 140,82.58 140,94.58 140,82.58 ; 140,102.27 140,114.27 140,102.27
  text "*" at -132.5,93.11 h50
Mechanical 15:
  region: -118.11,-144 -144,-144 -144,-118.11 -154,-118.11 -154,118.11 -144,118.11 -144,144 -118.11,144 -118.11,154 118.11,154 118.11,144 144,144 144,118.11 154,118.11 154,-118.11 144,-118.11 144,-144 118.11,-144 118.11,-154 -118.11,-154
  lines w6: -154,-118.11 -144,-118.11 -144,-144 -118.11,-144 -118.11,-154 118.11,-154 118.11,-144 144,-144 144,-118.11 154,-118.11 154,118.11 144,118.11 144,144 118.11,144 118.11,154 -118.11,154 -118.11,144 -144,144 -144,118.11 -154,118.11 -154,-118.11
3D body: height 10, standoff 0, extent 0,0 10,10
3D body "21-0144H_T4877-6-L.stp": height 32.09, standoff 0, extent -140,-140 140,140